# Altium footprint library BAT_1049P.PcbLib: 1 footprints
Each footprint in its own frame and in the unit in brackets; x right, y up, seen from the top. Pads: shape width x height; smd on the part's side, far side on the other; paste and mask are expansions set on the pad; w line width, h text height; cw(c..) or ccw(c..) is an arc to the next point about the centre after c.
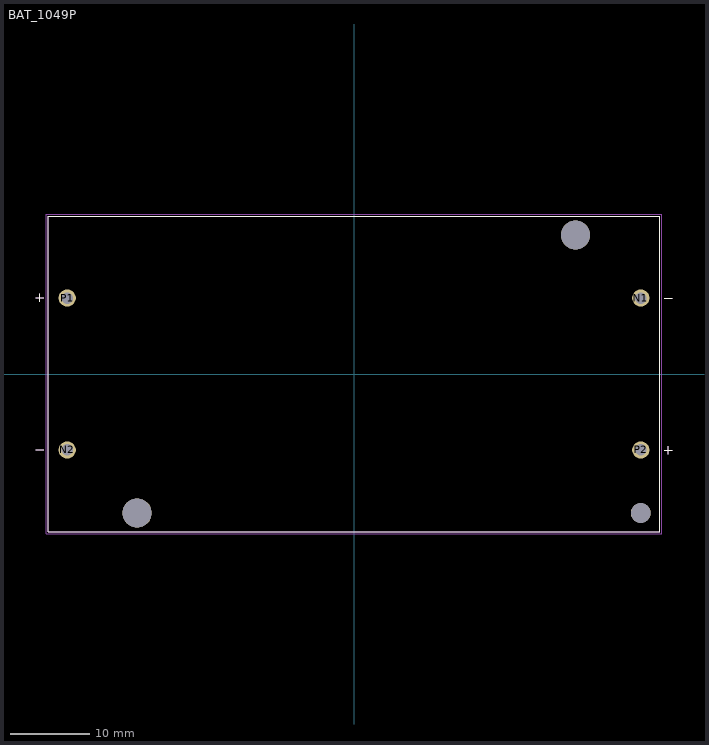
[diagram p0: the footprint, top view; thin cyan lines are the x and y axes]

## BAT_1049P [mm]
height 15.1
pads (7):
  round 2.175 hole 1.45: N1(36.11,9.565) N2(-36.11,-9.565) P1(-36.11,9.565) P2(36.11,-9.565)
  round 3.68 hole 3.68 unplated: ""(-27.31,-17.5) ""(27.89,17.5)
  round 2.51 hole 2.51 unplated: ""(36.11,-17.5)
Top Overlay:
  lines w0.127: -40.065,-9.565 -39.065,-9.565 ; -40.065,9.605 -39.065,9.605 ; -39.565,9.105 -39.565,10.105 ; 39.065,-9.605 40.065,-9.605 ; 39.065,9.565 40.065,9.565 ; 39.565,-10.105 39.565,-9.105 ; -38.53,-19.89 -38.53,19.89 38.53,19.89 38.53,-19.89 -38.53,-19.89
Assembly Top:
  lines w0.127: -40.065,-9.565 -39.065,-9.565 ; -40.065,9.605 -39.065,9.605 ; -39.565,9.105 -39.565,10.105 ; 39.065,-9.605 40.065,-9.605 ; 39.065,9.565 40.065,9.565 ; 39.565,-10.105 39.565,-9.105 ; -38.53,-19.89 -38.53,19.89 38.53,19.89 38.53,-19.89 -38.53,-19.89
Courtyard Top:
  lines w0.05: -38.78,-20.14 -38.78,20.14 38.78,20.14 38.78,-20.14 -38.78,-20.14
3D body "step_temp.STEP": height 14.91, standoff -3.56, extent -38.608,-19.888 38.448,19.888